# Altium footprint library standard-case.PcbLib: 285 footprints (part 12 of 18)
Each footprint in its own frame and in the unit in brackets; x right, y up, seen from the top. Pads: shape width x height; smd on the part's side, far side on the other; paste and mask are expansions set on the pad; w line width, h text height; cw(c..) or ccw(c..) is an arc to the next point about the centre after c.
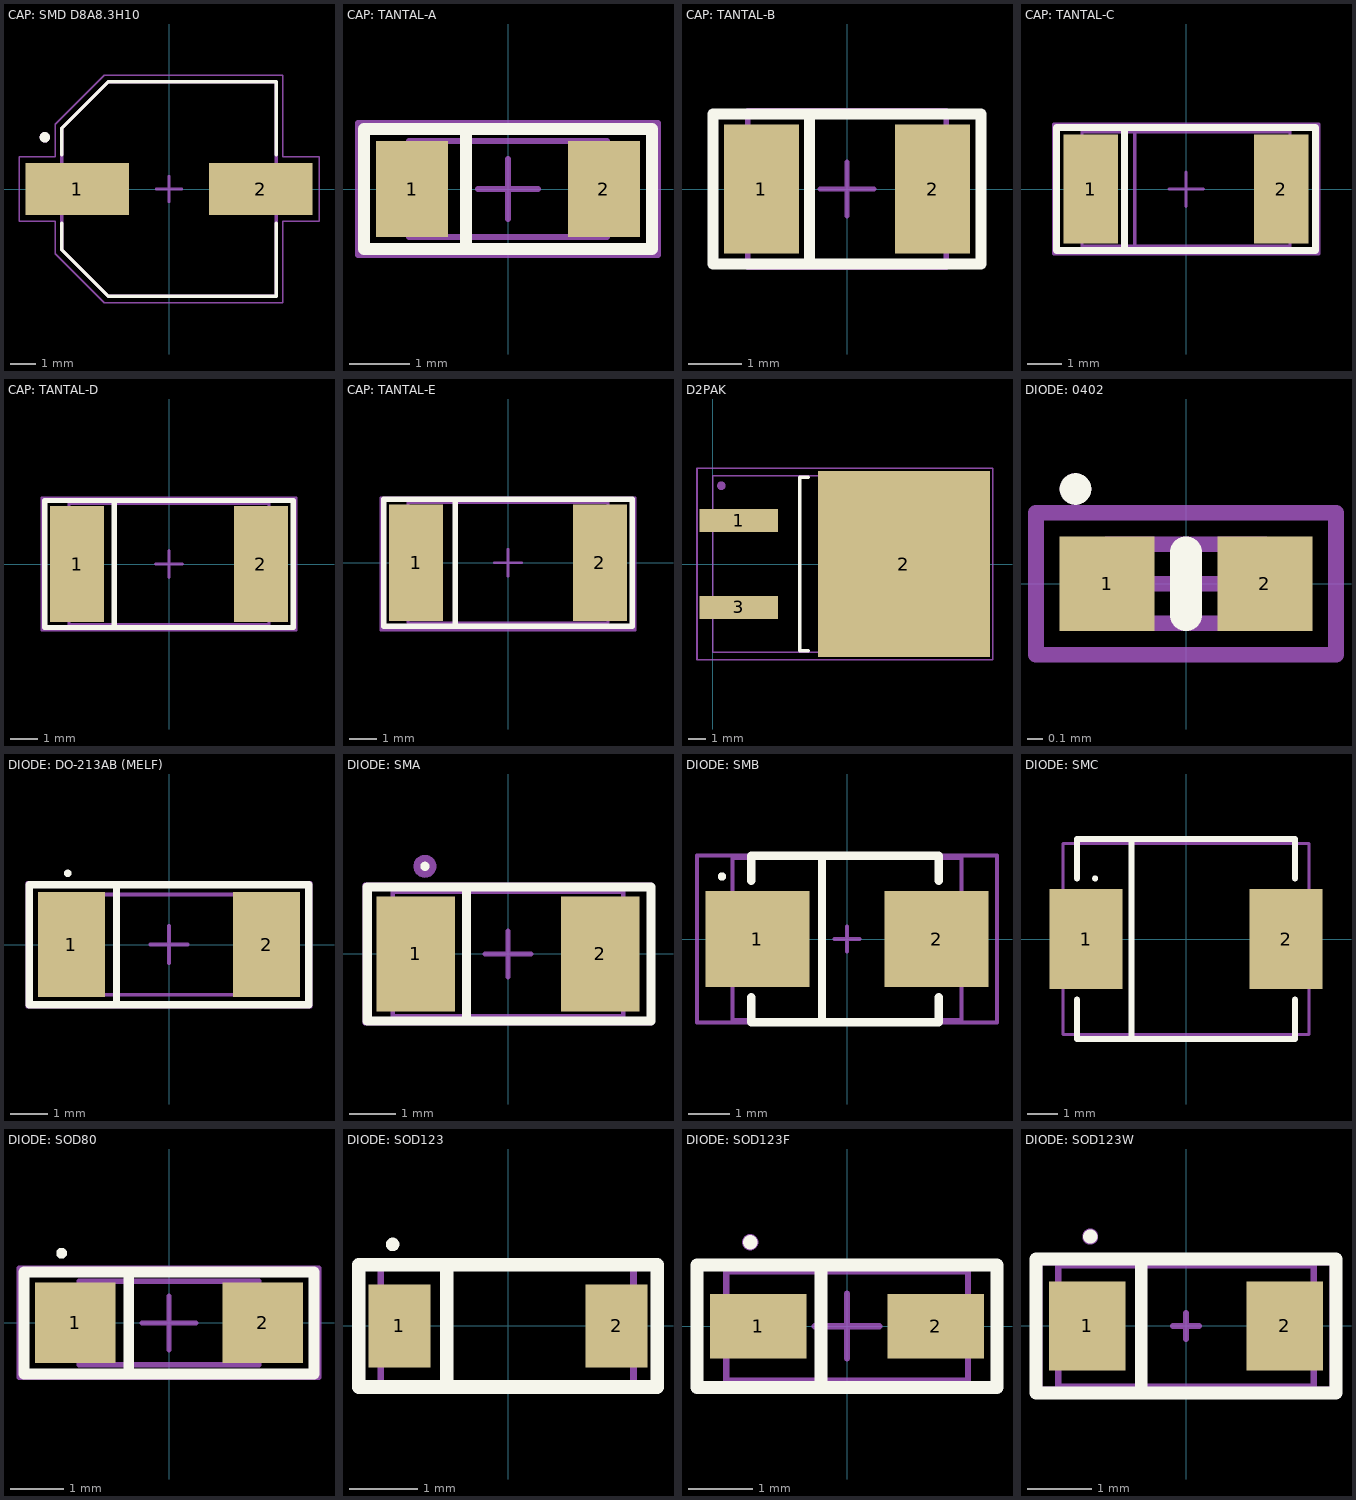
[diagram p11: the footprints below, top view; thin cyan lines are the x and y axes]

## CAP: SMD D8A8.3H10 [mm] "8.3x8.3"
height 20
pads (2):
  rect 4x2 smd: 1(-3.55,0) 2(3.55,0)
Top Overlay:
  circle w0.2: c-4.8,2 r0.1
  lines w0.127: -4.15,-1.32 -4.15,-2.35 -2.35,-4.15 4.15,-4.15 4.15,-1.32 ; -4.15,1.32 -4.15,2.35 -2.35,4.15 4.15,4.15 4.15,1.32
Mechanical 13:
  circle w0.2: c-4.8,2 r0.1
  lines w0.127: -4.15,-2.35 -4.15,2.35 -2.35,4.15 4.15,4.15 4.15,-4.15 -2.35,-4.15 -4.15,-2.35
Mechanical 15:
  lines w0.05: -5.8,-1.25 -4.4,-1.25 -4.4,-2.5 -2.5,-4.4 4.4,-4.4 4.4,-1.25 5.8,-1.25 5.8,1.25 4.4,1.25 4.4,4.4 -2.5,4.4 -4.4,2.5 -4.4,1.25 -5.8,1.25 -5.8,-1.25
  lines w0.1: -0.5,0 0.5,0 ; 0,-0.5 0,0.5
3D body "step_temp.STEP": height 10.2, standoff 0, extent -4.85,-4.15 4.85,4.15

## CAP: TANTAL-A [mm]
height 1.6
pads (2):
  rect 1.2x1.6 smd: 1(-1.6,0) 2(1.6,0)
Top Overlay:
  lines w0.2: -0.7,-1 -0.7,1 ; -2.4,-1 2.4,-1 2.4,1 -2.4,1 -2.4,-1
Mechanical 1:
  lines w0.1: -0.7,-0.8 -0.7,0.8 ; -1.651,-0.8 1.651,-0.8 1.651,0.8 -1.651,0.8 -1.651,-0.8
Mechanical 15:
  lines w0.1: -0.5,0 0.5,0 ; 0,-0.5 0,0.5 ; -2.5,-1.1 -2.5,1.1 2.5,1.1 2.5,-1.1 -2.5,-1.1
3D body "User Library-AVX_ACASE.STEP": height 1.71, standoff 0, extent -1.7,-0.84 1.7,0.84

## CAP: TANTAL-B [mm]
height 1.9
pads (2):
  rect 1.4x2.4 smd: 1(-1.6,0) 2(1.6,0)
Top Overlay:
  lines w0.2: -0.7,-1.4 -0.7,1.3 ; -2.5,-1.4 -2.5,1.4 2.5,1.4 2.5,-1.4 -2.5,-1.4
Mechanical 1:
  lines w0.1: -0.7,-1.465 -0.7,1.465 ; -1.85,-1.465 -1.85,1.465 1.85,1.465 1.85,-1.465 -1.85,-1.465
Mechanical 15:
  lines w0.1: -0.5,0 0.5,0 ; 0,-0.5 0,0.5 ; -2.5,-1.4 2.5,-1.4 2.5,1.4 -2.5,1.4 -2.5,-1.4
3D body "User Library-AVX_BCASE.STEP": height 2.03, standoff 0, extent -1.85,-1.465 1.85,1.465

## CAP: TANTAL-C [mm]
height 2.5
pads (2):
  rect 1.6x3.2 smd: 1(-2.8,0) 2(2.8,0)
Top Overlay:
  lines w0.2: -1.8,-1.8 -1.8,1.8 ; -3.8,-1.8 3.8,-1.8 3.8,1.8 -3.8,1.8 -3.8,-1.8
Mechanical 1:
  lines w0.1: -1.5,-1.675 -1.5,1.675 ; -3.05,-1.675 -3.05,1.675 3.05,1.675 3.05,-1.675 -3.05,-1.675
Mechanical 15:
  lines w0.1: -0.5,0 0.5,0 ; 0,-0.5 0,0.5 ; -3.875,-1.9 -3.875,1.9 3.9,1.9 3.9,-1.9 -3.875,-1.9
3D body "User Library-AVX_C_CASE.STEP": height 2.7, standoff 0, extent -3.05,-1.675 3.05,1.675

## CAP: TANTAL-D [mm]
height 2.9
pads (2):
  rect 2x4.3 smd: 1(-3.4,0) 2(3.4,0)
Top Overlay:
  lines w0.2: -2.025,-2.35 -2.025,2.35 ; -4.6,-2.35 4.6,-2.35 4.6,2.35 -4.6,2.35 -4.6,-2.35
Mechanical 1:
  lines w0.1: -2.025,-2.225 -2.025,2.225 ; -3.7,-2.225 -3.7,2.225 3.7,2.225 3.7,-2.225 -3.7,-2.225
Mechanical 15:
  lines w0.1: -0.5,0 0.5,0 ; 0,-0.5 0,0.5 ; -4.7,-2.45 -4.7,2.45 4.7,2.45 4.7,-2.45 -4.7,-2.45
3D body "User Library-AVX_D_CASE.STEP": height 3.01, standoff 0, extent -3.7,-2.225 3.7,2.225

## CAP: TANTAL-E [mm]
height 2.9
pads (2):
  rect 2x4.3 smd: 1(-3.4,0) 2(3.4,0)
Top Overlay:
  lines w0.2: -1.95,-2.325 -1.95,2.325 ; -4.6,-2.35 -4.6,2.35 4.6,2.35 4.6,-2.35 -4.6,-2.35
Mechanical 1:
  lines w0.1: -1.95,-2.225 -1.95,2.225 ; -3.7,-2.225 -3.7,2.225 3.7,2.225 3.7,-2.225 -3.7,-2.225
Mechanical 15:
  lines w0.1: -0.5,0 0.5,0 ; 0,-0.5 0,0.5 ; -4.7,-2.5 4.7,-2.5 4.7,2.4 -4.7,2.4 -4.7,-2.5
3D body "User Library-AVX_E_CASE.STEP": height 4.2, standoff 0, extent -3.7,-2.225 3.7,2.225

## D2PAK [mm]
height 2.38
pads (4):
  rect 4.5x1.3 smd: 1(1.5,2.5) 3(1.5,-2.5)
  rect 9.9x10.7 smd: 2(11,0)
  round 0.5 on Mech1: ""(0.5,4.5)
Top Overlay:
  lines w0.2: 5.5,-5 5,-5 5,5 5.5,5
Mechanical 1:
  lines w0.1: 0,-5.08 15.264,-5.08 15.264,5.08 0,5.08 0,-5.08
Mechanical 15:
  lines w0.1: -0.9,-5.5 16.1,-5.5 16.1,5.5 -0.9,5.5 -0.9,-5.5
3D body "User Library-DPAK.STEP": height 4.88, standoff -0.13, extent 0,-5.08 15.264,5.08

## DIODE: 0402 [mm]
height 0.35
pads (3):
  rect 0.6x0.6 smd: 1(-0.5,0) 2(0.5,0)
  round 0.2 on Mech1: ""(-0.7,0.6)
Top Overlay:
  circle w0.1: c-0.7,0.6 r0.05
  lines w0.2: 0,-0.2 0,0.2
Mechanical 1:
  lines w0.1: -0.5,-0.25 -0.5,0.25 0.5,0.25 0.5,-0.25 -0.5,-0.25
Mechanical 15:
  lines w0.1: -0.25,0 0.25,0 ; 0,-0.25 0,0.25 ; -0.95,-0.45 -0.95,0.45 0.95,0.45 0.95,-0.45 -0.95,-0.45
3D body: height 0.4, standoff 0, extent -0.5,-0.25 0.5,0.25

## DIODE: DO-213AB (MELF) [mm] "MELF Diode, 2-Leads, Body 5,01x2,53mm, IPC Medium Density"
height 2.67
pads (2):
  rect 1.8x2.8 smd: 1(-2.6,0) 2(2.6,0)
Top Overlay:
  circle w0.1: c-2.7,1.9 r0.05
  lines w0.2: -1.4,-1.6 -1.4,1.6 ; -3.725,-1.6 -3.725,1.6 3.725,1.6 3.725,-1.6 -3.725,-1.6
Mechanical 1:
  lines w0.1: -1.4,-1.335 -1.4,1.335 ; -2.605,-1.335 2.605,-1.335 2.605,1.335 -2.605,1.335 -2.605,-1.335
Mechanical 15:
  lines w0.1: -0.5,0 0.5,0 ; 0,-0.5 0,0.5 ; -3.775,-1.65 3.775,-1.65 3.775,1.65 -3.775,1.65 -3.775,-1.65
3D body "User Library-MELF DO213AB.STEP": height 2.59, standoff 0.01, extent -2.4,-1.3 2.4,1.3

## DIODE: SMA [mm]
pads (3):
  rect 1.7x2.5 smd: 1(-2,0) 2(2,0)
  round 0.5 on Mech1: ""(-1.8,1.9)
Top Overlay:
  circle w0.1: c-1.8,1.9 r0.05
  lines w0.2: -0.9,-1.45 -0.9,1.45 ; -3.05,-1.45 3.1,-1.45 3.1,1.45 -3.05,1.45 -3.05,-1.45
Mechanical 1:
  lines w0.1: -2.5,-1.35 2.5,-1.35 2.5,1.35 -2.5,1.35 -2.5,-1.35
Mechanical 15:
  lines w0.1: -0.5,0 0.5,0 ; 0,-0.5 0,0.5 ; -3.1,-1.5 -3.1,1.5 3.1,1.5 3.1,-1.5 -3.1,-1.5
3D body "User Library-Diode Molded BodyDIOM5025X231N.STEP": height 2.28, standoff -0.03, extent -2.5,-1.35 2.5,1.35

## DIODE: SMB [mm]
pads (2):
  rect 2.5x2.3 smd: 1(-2.15,0) 2(2.15,0)
Top Overlay:
  circle w0.1: c-3,1.5 r0.05
  lines w0.2: -2.3,-1.4 -2.3,-2 2.2,-2 2.2,-1.4 ; -2.3,1.4 -2.3,2 2.2,2 2.2,1.4 ; -0.6,-2 -0.6,2
Mechanical 1:
  lines w0.1: -0.6,-1.95 -0.6,1.95 ; -2.75,-1.95 2.75,-1.95 2.75,1.95 -2.75,1.95 -2.75,-1.95
Mechanical 15:
  lines w0.1: -0.3,0 0.3,0 ; 0,-0.3 0,0.3 ; -3.6,-2 -3.6,2 3.6,2 3.6,-2 -3.6,-2
3D body "User Library-DIOM5539X24.STEP": height 2.45, standoff 0.03, extent -2.75,-1.95 2.75,1.95

## DIODE: SMC [mm]
pads (2):
  rect 2.4x3.3 smd: 1(-3.3,0) 2(3.3,0)
Top Overlay:
  circle w0.1: c-3,2 r0.05
  lines w0.2: -3.6,-2 -3.6,-3.3 3.6,-3.3 3.6,-2 ; -3.6,2 -3.6,3.3 3.6,3.3 3.6,2 ; -1.8,-3.3 -1.8,3.3
Mechanical 1:
  lines w0.1: -1.8,-3.15 -1.8,3.15 ; -4.064,-3.15 -4.064,3.15 4.064,3.15 4.064,-3.15 -4.064,-3.15
3D body "User Library-DO-214AB(SMC).STEP": height 2.67, standoff 0.03, extent -4.064,-3.15 4.064,3.15

## DIODE: SOD80 [mm]
height 2
pads (2):
  rect 1.5x1.5 smd: 1(-1.75,0) 2(1.75,0)
Top Overlay:
  circle w0.1: c-2,1.3 r0.05
  lines w0.2: -0.75,-0.825 -0.75,0 -0.75,0.825 ; -2.7,-0.95 -2.7,0.95 2.7,0.95 2.7,-0.95 -2.7,-0.95
Mechanical 1:
  lines w0.1: -0.75,-0.775 -0.75,0.775 ; -1.676,-0.775 -1.676,0.775 1.675,0.775 1.675,-0.775 -1.676,-0.775
Mechanical 15:
  lines w0.1: -0.5,0 0.5,0 ; 0,-0.5 0,0.5 ; -2.794,-1.016 2.794,-1.016 2.794,1.016 -2.794,1.016 -2.794,-1.016
3D body "SOD80-2.step": height 1.51, standoff -0.01, extent -1.677,-0.77 1.676,0.77

## DIODE: SOD123 [mm]
pads (2):
  rect 0.91x1.22 smd: 1(-1.6,0) 2(1.6,0)
Top Overlay:
  circle w0.1: c-1.7,1.2 r0.05
  lines w0.2: -0.9,-0.9 -0.9,0.9 ; -2.2,-0.9 -2.2,0.9 2.2,0.9 2.2,-0.9 -2.2,-0.9
Mechanical 1:
  lines w0.1: -0.9,-0.9 -0.9,0.9 ; -1.875,-0.9 -1.875,0.9 1.85,0.9 1.85,-0.9 -1.875,-0.9
Mechanical 15:
  lines w0.1: -2.2,-0.9 -2.2,0.9 2.2,0.9 2.2,-0.9 -2.2,-0.9
3D body "User Library-SOD-123.STEP": height 1.25, standoff 0, extent -1.849,-0.8 1.849,0.8

## DIODE: SOD123F [mm]
height 1
pads (2):
  rect 1.5x1 smd: 1(-1.375,0) 2(1.375,0)
Top Overlay:
  circle w0.2: c-1.5,1.3 r0.01
  lines w0.2: -0.4,-0.9 -0.4,0.925 ; -2.325,-0.95 -2.325,0.95 2.325,0.95 2.325,-0.95 -2.325,-0.95
Mechanical 1:
  circle w0.2: c-1.5,1.3 r0.025
  lines w0.1: -0.4,-0.85 -0.4,0.85 ; -1.875,-0.85 1.875,-0.85 1.875,0.85 -1.875,0.85 -1.875,-0.85
Mechanical 15:
  lines w0.1: -0.5,0 0.5,0 ; 0,-0.5 0,0.5 ; -2.325,-0.95 2.325,-0.95 2.325,0.95 -2.325,0.95 -2.325,-0.95
3D body "SOD123F.STEP": height 1.23, standoff 0.02, extent -1.9,-0.85 1.85,0.85

## DIODE: SOD123W [mm]
pads (2):
  rect 1.2x1.4 smd: 1(-1.55,0) 2(1.55,0)
Top Overlay:
  circle w0.2: c-1.5,1.4 r0.01
  lines w0.2: -0.7,-1.05 -0.7,1.05 ; -2.35,-1.05 -2.35,1.05 2.35,1.05 2.35,-1.05 -2.35,-1.05
Mechanical 1:
  circle w0.2: c-1.5,1.4 r0.025
  lines w0.1: -0.7,-0.95 -0.7,0.95 ; 2,-0.95 2,0.95 ; 2,-0.95 2,-0.95 ; 2,-0.95 -2,-0.95 -2,0.95 2,0.95 ; 2,0.95 2,0.95
Mechanical 15:
  lines w0.1: -0.2,0 0.2,0 ; 0,-0.2 0,0.2 ; -2.3,-1 2.3,-1 2.3,1 -2.3,1 -2.3,-1
3D body "User Library-SOD123W.STEP": height 1.1, standoff -0.01, extent -2,-0.95 2,0.95